# Altium integrated library Altium_Header.IntLib: 503 symbols (part 10 of 11)
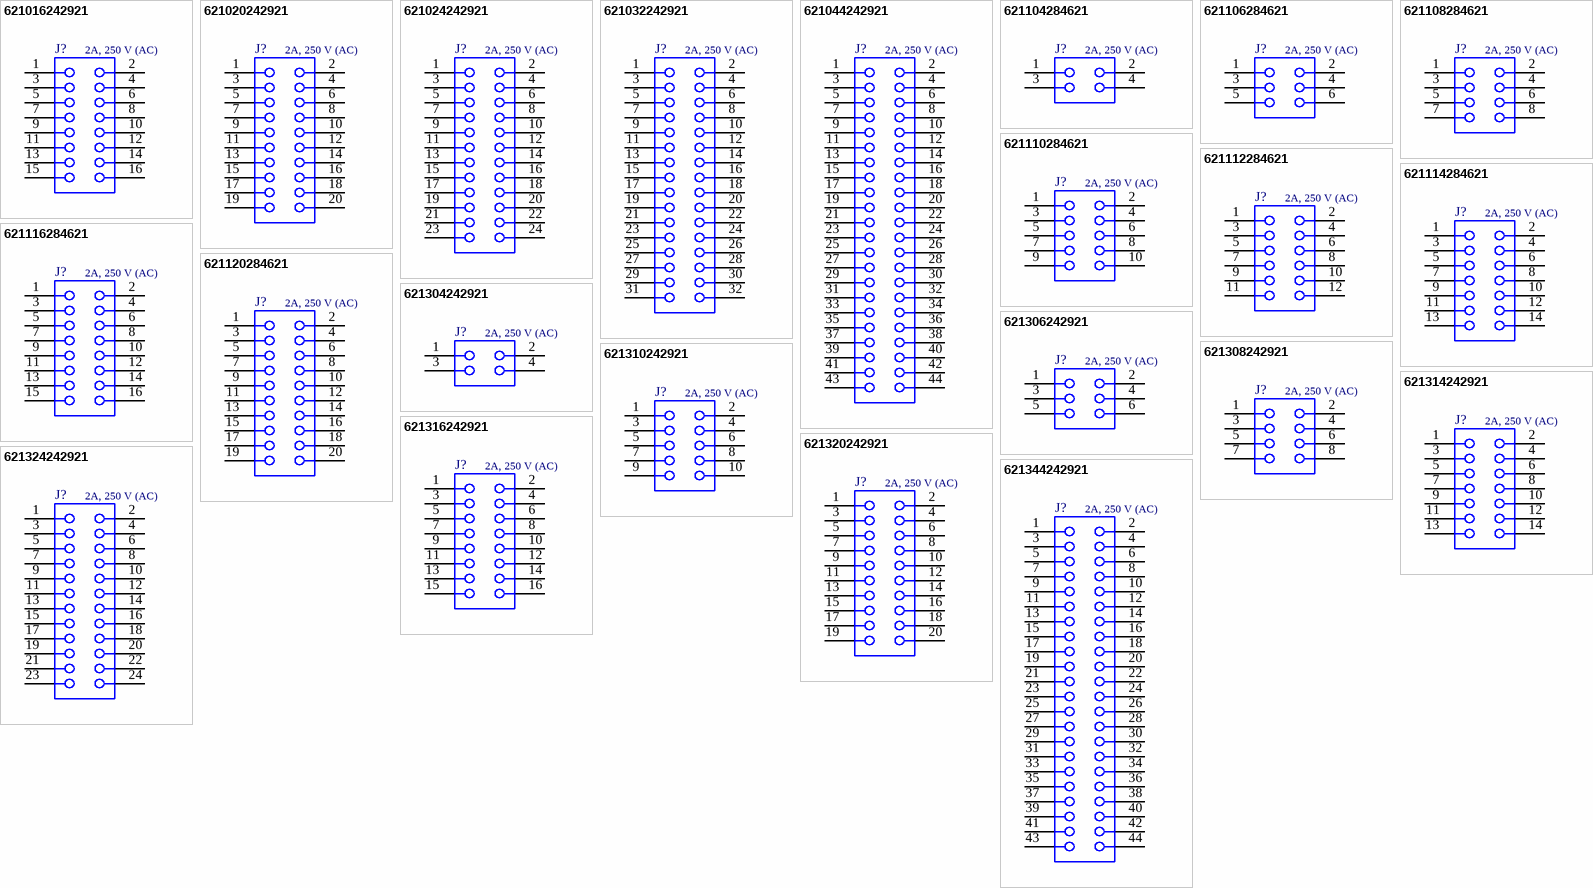
[diagram p25: symbols 621016242921 to 621344242921]

## 621306242921
designator J?, comment 2A, 250 V (AC)
WR-PHD Socket Header, SMT, pitch 2mm, Dual Row, Vertical, 6p; Manufacturer Part Number: 621306242921; Manufacturer: Wurth Elektronik; Pin Number: 6; Working Voltage: 250VAC; Withstanding Voltage: 500VAC; Contact Resistance: 20mOhm; ComponentLink1Description: Datasheet; ComponentLink1URL: https://www.we-online.com/catalog/datasheet/621306242921.pdf; Published Date: May 2020; Pitch: 2mm; Packaging: Tape and Reel; Gender: Socket Header; Rated Current: 2A; Row Number: Dual; Orientation: Vertical; Supplier 1 URL: N/A; Supplier 2 URL: N/A; Supplier 3 URL: N/A; Mount: SMD/SMT; Operating Temperature Max: + 85 C; Operating Temperature Min: - 25 C; Supplier 1: Mouser; Supplier 1 Part Number: N/A; Supplier 2: Digi-Key; Supplier 2 Part Number: N/A; Supplier 3: thegioiic; Supplier 3 Part Number: N/A; Value: 2A, 250 V (AC)
footprint 621306242921
pins: 1, 2, 3, 4, 5, 6

## 621308242921
designator J?, comment 2A, 250 V (AC)
WR-PHD Socket Header, SMT, pitch 2mm, Dual Row, Vertical, 8p; Manufacturer Part Number: 621308242921; Manufacturer: Wurth Elektronik; Pin Number: 8; Working Voltage: 250VAC; Withstanding Voltage: 500VAC; Contact Resistance: 20mOhm; ComponentLink1Description: Datasheet; ComponentLink1URL: https://www.we-online.com/catalog/datasheet/621308242921.pdf; Published Date: May 2020; Pitch: 2mm; Packaging: Tape and Reel; Gender: Socket Header; Rated Current: 2A; Row Number: Dual; Orientation: Vertical; Supplier 1 URL: N/A; Supplier 2 URL: N/A; Supplier 3 URL: N/A; Mount: SMD/SMT; Operating Temperature Max: + 85 C; Operating Temperature Min: - 25 C; Supplier 1: Mouser; Supplier 1 Part Number: N/A; Supplier 2: Digi-Key; Supplier 2 Part Number: N/A; Supplier 3: thegioiic; Supplier 3 Part Number: N/A; Value: 2A, 250 V (AC)
footprint 621308242921
pins: 1, 2, 3, 4, 5, 6, 7, 8

## 621310242921
designator J?, comment 2A, 250 V (AC)
WR-PHD Socket Header, SMT, pitch 2mm, Dual Row, Vertical, 10p; Manufacturer Part Number: 621310242921; Manufacturer: Wurth Elektronik; Pin Number: 10; Working Voltage: 250VAC; Withstanding Voltage: 500VAC; Contact Resistance: 20mOhm; ComponentLink1Description: Datasheet; ComponentLink1URL: https://www.we-online.com/catalog/datasheet/621310242921.pdf; Published Date: May 2020; Pitch: 2mm; Packaging: Tape and Reel; Gender: Socket Header; Rated Current: 2A; Row Number: Dual; Orientation: Vertical; Supplier 1 URL: N/A; Supplier 2 URL: N/A; Supplier 3 URL: N/A; Mount: SMD/SMT; Operating Temperature Max: + 85 C; Operating Temperature Min: - 25 C; Supplier 1: Mouser; Supplier 1 Part Number: N/A; Supplier 2: Digi-Key; Supplier 2 Part Number: N/A; Supplier 3: thegioiic; Supplier 3 Part Number: N/A; Value: 2A, 250 V (AC)
footprint 621310242921
pins: 1, 2, 3, 4, 5, 6, 7, 8, 9, 10

## 621314242921
designator J?, comment 2A, 250 V (AC)
WR-PHD Socket Header, SMT, pitch 2mm, Dual Row, Vertical, 14p; Manufacturer Part Number: 621314242921; Manufacturer: Wurth Elektronik; Pin Number: 14; Working Voltage: 250VAC; Withstanding Voltage: 500VAC; Contact Resistance: 20mOhm; ComponentLink1Description: Datasheet; ComponentLink1URL: https://www.we-online.com/catalog/datasheet/621314242921.pdf; Published Date: May 2020; Pitch: 2mm; Packaging: Tape and Reel; Gender: Socket Header; Rated Current: 2A; Row Number: Dual; Orientation: Vertical; Supplier 1 URL: N/A; Supplier 2 URL: N/A; Supplier 3 URL: N/A; Mount: SMD/SMT; Operating Temperature Max: + 85 C; Operating Temperature Min: - 25 C; Supplier 1: Mouser; Supplier 1 Part Number: N/A; Supplier 2: Digi-Key; Supplier 2 Part Number: N/A; Supplier 3: thegioiic; Supplier 3 Part Number: N/A; Value: 2A, 250 V (AC)
footprint 621314242921
pins: 1, 2, 3, 4, 5, 6, 7, 8, 9, 10, 11, 12, 13, 14

## 621316242921
designator J?, comment 2A, 250 V (AC)
WR-PHD Socket Header, SMT, pitch 2mm, Dual Row, Vertical, 16p; Manufacturer Part Number: 621316242921; Manufacturer: Wurth Elektronik; Pin Number: 16; Working Voltage: 250VAC; Withstanding Voltage: 500VAC; Contact Resistance: 20mOhm; ComponentLink1Description: Datasheet; ComponentLink1URL: https://www.we-online.com/catalog/datasheet/621316242921.pdf; Published Date: May 2020; Pitch: 2mm; Packaging: Tape and Reel; Gender: Socket Header; Rated Current: 2A; Row Number: Dual; Orientation: Vertical; Supplier 1 URL: N/A; Supplier 2 URL: N/A; Supplier 3 URL: N/A; Mount: SMD/SMT; Operating Temperature Max: + 85 C; Operating Temperature Min: - 25 C; Supplier 1: Mouser; Supplier 1 Part Number: N/A; Supplier 2: Digi-Key; Supplier 2 Part Number: N/A; Supplier 3: thegioiic; Supplier 3 Part Number: N/A; Value: 2A, 250 V (AC)
footprint 621316242921
pins: 1, 2, 3, 4, 5, 6, 7, 8, 9, 10, 11, 12, 13, 14, 15, 16

## 621320242921
designator J?, comment 2A, 250 V (AC)
WR-PHD Socket Header, SMT, pitch 2mm, Dual Row, Vertical, 20p; Manufacturer Part Number: 621320242921; Manufacturer: Wurth Elektronik; Pin Number: 20; Working Voltage: 250VAC; Withstanding Voltage: 500VAC; Contact Resistance: 20mOhm; ComponentLink1Description: Datasheet; ComponentLink1URL: https://www.we-online.com/catalog/datasheet/621320242921.pdf; Published Date: May 2020; Pitch: 2mm; Packaging: Tape and Reel; Gender: Socket Header; Rated Current: 2A; Row Number: Dual; Orientation: Vertical; Supplier 1 URL: N/A; Supplier 2 URL: N/A; Supplier 3 URL: N/A; Mount: SMD/SMT; Operating Temperature Max: + 85 C; Operating Temperature Min: - 25 C; Supplier 1: Mouser; Supplier 1 Part Number: N/A; Supplier 2: Digi-Key; Supplier 2 Part Number: N/A; Supplier 3: thegioiic; Supplier 3 Part Number: N/A; Value: 2A, 250 V (AC)
footprint 621320242921
pins: 1, 2, 3, 4, 5, 6, 7, 8, 9, 10, 11, 12, 13, 14, 15, 16, 17, 18, 19, 20

## 621324242921
designator J?, comment 2A, 250 V (AC)
WR-PHD Socket Header, SMT, pitch 2mm, Dual Row, Vertical, 24p; Manufacturer Part Number: 621324242921; Manufacturer: Wurth Elektronik; Pin Number: 24; Working Voltage: 250VAC; Withstanding Voltage: 500VAC; Contact Resistance: 20mOhm; ComponentLink1Description: Datasheet; ComponentLink1URL: https://www.we-online.com/catalog/datasheet/621324242921.pdf; Published Date: May 2020; Pitch: 2mm; Packaging: Tape and Reel; Gender: Socket Header; Rated Current: 2A; Row Number: Dual; Orientation: Vertical; Supplier 1 URL: N/A; Supplier 2 URL: N/A; Supplier 3 URL: N/A; Mount: SMD/SMT; Operating Temperature Max: + 85 C; Operating Temperature Min: - 25 C; Supplier 1: Mouser; Supplier 1 Part Number: N/A; Supplier 2: Digi-Key; Supplier 2 Part Number: N/A; Supplier 3: thegioiic; Supplier 3 Part Number: N/A; Value: 2A, 250 V (AC)
footprint 621324242921
pins: 1, 2, 3, 4, 5, 6, 7, 8, 9, 10, 11, 12, 13, 14, 15, 16, 17, 18, 19, 20, 21, 22, 23, 24

## 621344242921
designator J?, comment 2A, 250 V (AC)
WR-PHD Socket Header, SMT, pitch 2mm, Dual Row, Vertical, 44p; Manufacturer Part Number: 621344242921; Manufacturer: Wurth Elektronik; Pin Number: 44; Working Voltage: 250VAC; Withstanding Voltage: 500VAC; Contact Resistance: 20mOhm; ComponentLink1Description: Datasheet; ComponentLink1URL: https://www.we-online.com/catalog/datasheet/621344242921.pdf; Published Date: May 2020; Pitch: 2mm; Packaging: Tape and Reel; Gender: Socket Header; Rated Current: 2A; Row Number: Dual; Orientation: Vertical; Supplier 1 URL: N/A; Supplier 2 URL: N/A; Supplier 3 URL: N/A; Mount: SMD/SMT; Operating Temperature Max: + 85 C; Operating Temperature Min: - 25 C; Supplier 1: Mouser; Supplier 1 Part Number: N/A; Supplier 2: Digi-Key; Supplier 2 Part Number: N/A; Supplier 3: thegioiic; Supplier 3 Part Number: N/A; Value: 2A, 250 V (AC)
footprint 621344242921
pins: 1, 2, 3, 4, 5, 6, 7, 8, 9, 10, 11, 12, 13, 14, 15, 16, 17, 18, 19, 20, 21, 22, 23, 24, 25, 26, 27, 28, 29, 30, 31, 32, 33, 34, 35, 36, 37, 38, 39, 40, 41, 42, 43, 44


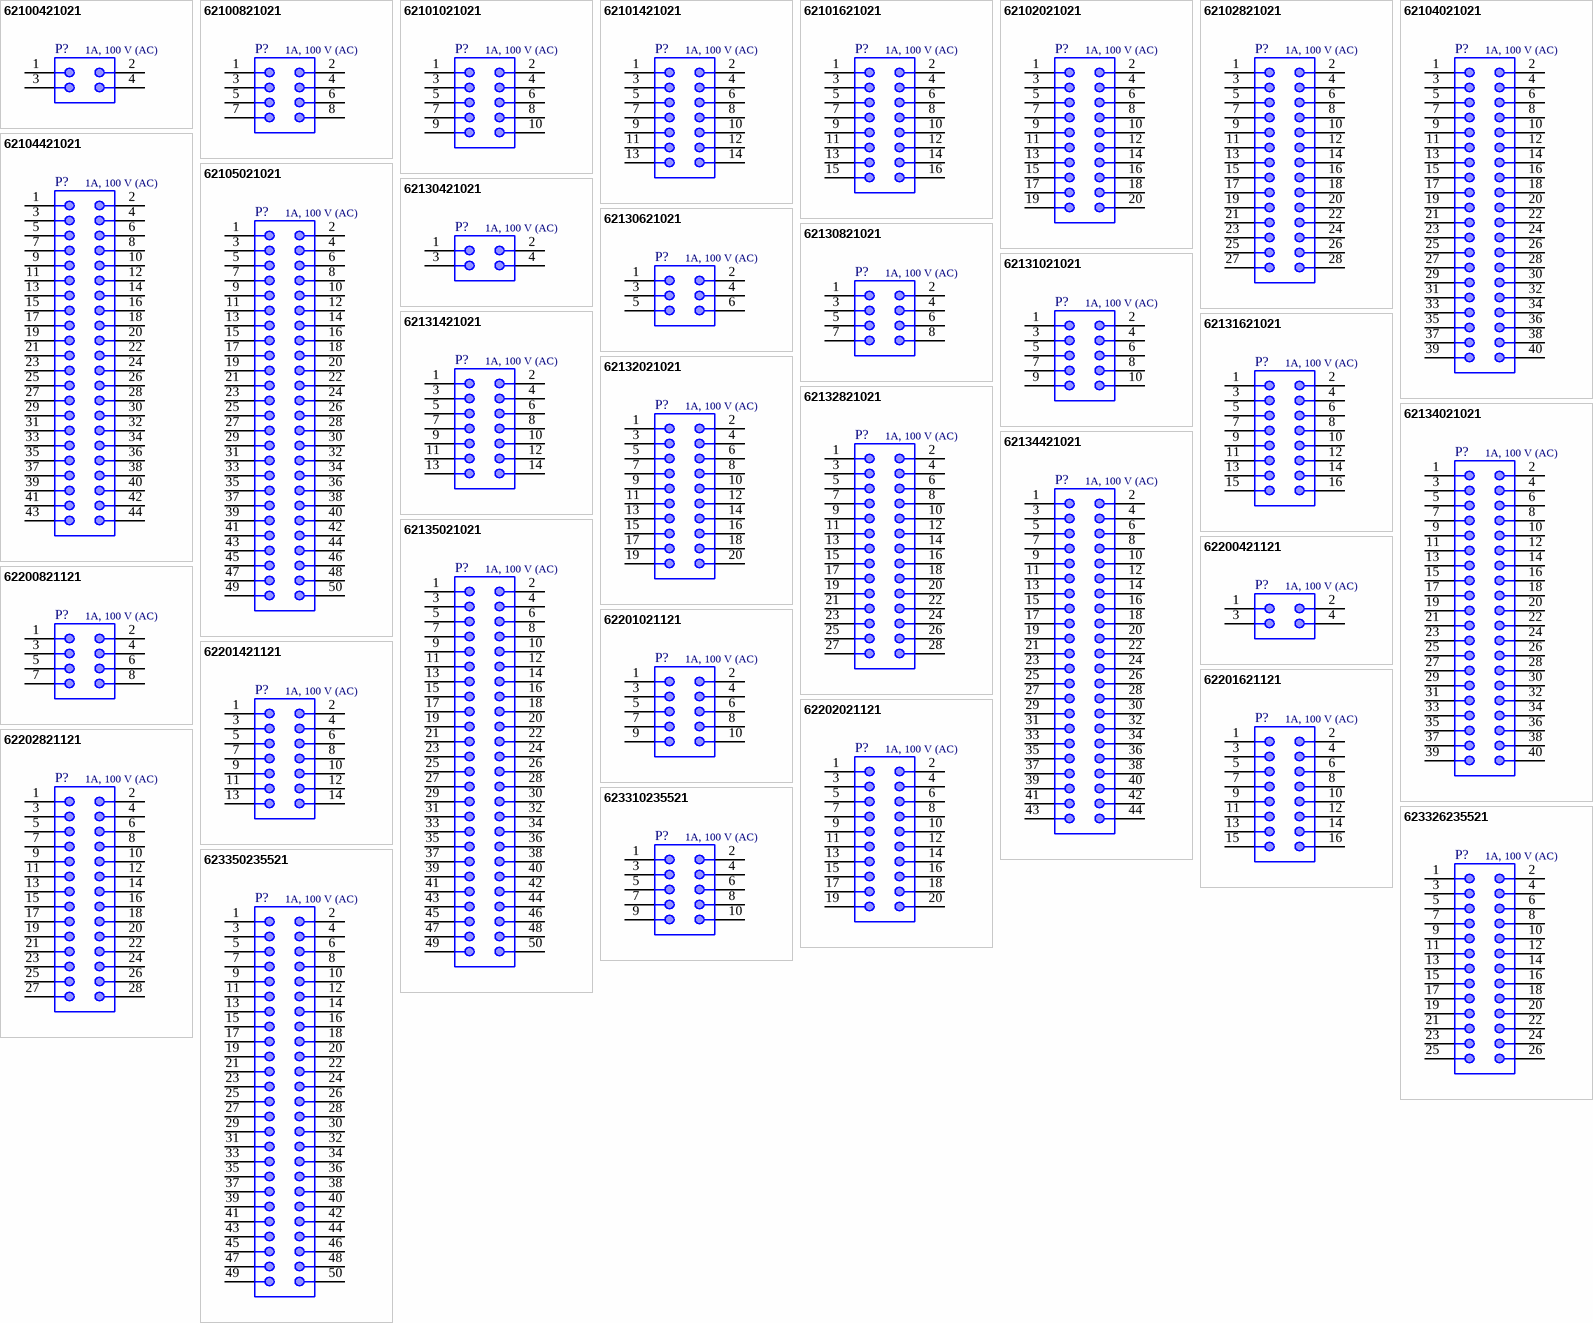
[diagram p15: symbols 62100421021 to 623350235521]

## 62100421021
designator P?, comment 1A, 100 V (AC)
WR-PHD Pin Header, SMT, pitch 1.27mm, Dual Row, Vertical, 4p; Manufacturer Part Number: 62100421021; Manufacturer: Wurth Elektronik; Pin Number: 4; Working Voltage: 100VAC; Withstanding Voltage: 500VAC; Contact Resistance: 20mOhm; ComponentLink1Description: Datasheet; ComponentLink1URL: https://www.we-online.com/catalog/datasheet/62100421021.pdf; Published Date: May 2020; Pitch: 1.27mm; Packaging: Tube; Gender: Pin Header; Rated Current: 1A; Row Number: Dual; Orientation: Vertical; Supplier 1 URL: N/A; Supplier 2 URL: N/A; Supplier 3 URL: N/A; LCSC Part #: N/A; Mount: SMD/SMT; Operating Temperature Max: + 105 C; Operating Temperature Min: - 40 C; Supplier 1: Mouser; Supplier 1 Part Number: N/A; Supplier 2: Digi-Key; Supplier 2 Part Number: N/A; Supplier 3: thegioiic; Supplier 3 Part Number: N/A; Value: 1A, 100 V (AC)
footprint 62100421021
pins: 1, 2, 3, 4

## 62100821021
designator P?, comment 1A, 100 V (AC)
WR-PHD Pin Header, SMT, pitch 1.27mm, Dual Row, Vertical, 8p; Manufacturer Part Number: 62100821021; Manufacturer: Wurth Elektronik; Pin Number: 8; Working Voltage: 100VAC; Withstanding Voltage: 500VAC; Contact Resistance: 20mOhm; ComponentLink1Description: Datasheet; ComponentLink1URL: https://www.we-online.com/catalog/datasheet/62100821021.pdf; Published Date: May 2020; Pitch: 1.27mm; Packaging: Tube; Gender: Pin Header; Rated Current: 1A; Row Number: Dual; Orientation: Vertical; Supplier 1 URL: N/A; Supplier 2 URL: N/A; Supplier 3 URL: N/A; LCSC Part #: N/A; Mount: SMD/SMT; Operating Temperature Max: + 105 C; Operating Temperature Min: - 40 C; Supplier 1: Mouser; Supplier 1 Part Number: N/A; Supplier 2: Digi-Key; Supplier 2 Part Number: N/A; Supplier 3: thegioiic; Supplier 3 Part Number: N/A; Value: 1A, 100 V (AC)
footprint 62100821021
pins: 1, 2, 3, 4, 5, 6, 7, 8

## 62101021021
designator P?, comment 1A, 100 V (AC)
WR-PHD Pin Header, SMT, pitch 1.27mm, Dual Row, Vertical, 10p; Manufacturer Part Number: 62101021021; Manufacturer: Wurth Elektronik; Pin Number: 10; Working Voltage: 100VAC; Withstanding Voltage: 500VAC; Contact Resistance: 20mOhm; ComponentLink1Description: Datasheet; ComponentLink1URL: https://www.we-online.com/catalog/datasheet/62101021021.pdf; Published Date: May 2020; Pitch: 1.27mm; Packaging: Tube; Gender: Pin Header; Rated Current: 1A; Row Number: Dual; Orientation: Vertical; Supplier 1 URL: N/A; Supplier 2 URL: N/A; Supplier 3 URL: N/A; LCSC Part #: N/A; Mount: SMD/SMT; Operating Temperature Max: + 105 C; Operating Temperature Min: - 40 C; Supplier 1: Mouser; Supplier 1 Part Number: N/A; Supplier 2: Digi-Key; Supplier 2 Part Number: N/A; Supplier 3: thegioiic; Supplier 3 Part Number: N/A; Value: 1A, 100 V (AC)
footprint 62101021021
pins: 1, 2, 3, 4, 5, 6, 7, 8, 9, 10

## 62101421021
designator P?, comment 1A, 100 V (AC)
WR-PHD Pin Header, SMT, pitch 1.27mm, Dual Row, Vertical, 14p; Manufacturer Part Number: 62101421021; Manufacturer: Wurth Elektronik; Pin Number: 14; Working Voltage: 100VAC; Withstanding Voltage: 500VAC; Contact Resistance: 20mOhm; ComponentLink1Description: Datasheet; ComponentLink1URL: https://www.we-online.com/catalog/datasheet/62101421021.pdf; Published Date: May 2020; Pitch: 1.27mm; Packaging: Tube; Gender: Pin Header; Rated Current: 1A; Row Number: Dual; Orientation: Vertical; Supplier 1 URL: N/A; Supplier 2 URL: N/A; Supplier 3 URL: N/A; LCSC Part #: N/A; Mount: SMD/SMT; Operating Temperature Max: + 105 C; Operating Temperature Min: - 40 C; Supplier 1: Mouser; Supplier 1 Part Number: N/A; Supplier 2: Digi-Key; Supplier 2 Part Number: N/A; Supplier 3: thegioiic; Supplier 3 Part Number: N/A; Value: 1A, 100 V (AC)
footprint 62101421021
pins: 1, 2, 3, 4, 5, 6, 7, 8, 9, 10, 11, 12, 13, 14

## 62101621021
designator P?, comment 1A, 100 V (AC)
WR-PHD Pin Header, SMT, pitch 1.27mm, Dual Row, Vertical, 16p; Manufacturer Part Number: 62101621021; Manufacturer: Wurth Elektronik; Pin Number: 16; Working Voltage: 100VAC; Withstanding Voltage: 500VAC; Contact Resistance: 20mOhm; ComponentLink1Description: Datasheet; ComponentLink1URL: https://www.we-online.com/catalog/datasheet/62101621021.pdf; Published Date: May 2020; Pitch: 1.27mm; Packaging: Tube; Gender: Pin Header; Rated Current: 1A; Row Number: Dual; Orientation: Vertical; Supplier 1 URL: N/A; Supplier 2 URL: N/A; Supplier 3 URL: N/A; LCSC Part #: N/A; Mount: SMD/SMT; Operating Temperature Max: + 105 C; Operating Temperature Min: - 40 C; Supplier 1: Mouser; Supplier 1 Part Number: N/A; Supplier 2: Digi-Key; Supplier 2 Part Number: N/A; Supplier 3: thegioiic; Supplier 3 Part Number: N/A; Value: 1A, 100 V (AC)
footprint 62101621021
pins: 1, 2, 3, 4, 5, 6, 7, 8, 9, 10, 11, 12, 13, 14, 15, 16

## 62102021021
designator P?, comment 1A, 100 V (AC)
WR-PHD Pin Header, SMT, pitch 1.27mm, Dual Row, Vertical, 20p; Manufacturer Part Number: 62102021021; Manufacturer: Wurth Elektronik; Pin Number: 20; Working Voltage: 100VAC; Withstanding Voltage: 500VAC; Contact Resistance: 20mOhm; ComponentLink1Description: Datasheet; ComponentLink1URL: https://www.we-online.com/catalog/datasheet/62102021021.pdf; Published Date: May 2020; Pitch: 1.27mm; Packaging: Tube; Gender: Pin Header; Rated Current: 1A; Row Number: Dual; Orientation: Vertical; Supplier 1 URL: N/A; Supplier 2 URL: N/A; Supplier 3 URL: N/A; LCSC Part #: N/A; Mount: SMD/SMT; Operating Temperature Max: + 105 C; Operating Temperature Min: - 40 C; Supplier 1: Mouser; Supplier 1 Part Number: N/A; Supplier 2: Digi-Key; Supplier 2 Part Number: N/A; Supplier 3: thegioiic; Supplier 3 Part Number: N/A; Value: 1A, 100 V (AC)
footprint 62102021021
pins: 1, 2, 3, 4, 5, 6, 7, 8, 9, 10, 11, 12, 13, 14, 15, 16, 17, 18, 19, 20

## 62102821021
designator P?, comment 1A, 100 V (AC)
WR-PHD Pin Header, SMT, pitch 1.27mm, Dual Row, Vertical, 28p; Manufacturer Part Number: 62102821021; Manufacturer: Wurth Elektronik; Pin Number: 28; Working Voltage: 100VAC; Withstanding Voltage: 500VAC; Contact Resistance: 20mOhm; ComponentLink1Description: Datasheet; ComponentLink1URL: https://www.we-online.com/catalog/datasheet/62102821021.pdf; Published Date: May 2020; Pitch: 1.27mm; Packaging: Tube; Gender: Pin Header; Rated Current: 1A; Row Number: Dual; Orientation: Vertical; Supplier 1 URL: N/A; Supplier 2 URL: N/A; Supplier 3 URL: N/A; LCSC Part #: N/A; Mount: SMD/SMT; Operating Temperature Max: + 105 C; Operating Temperature Min: - 40 C; Supplier 1: Mouser; Supplier 1 Part Number: N/A; Supplier 2: Digi-Key; Supplier 2 Part Number: N/A; Supplier 3: thegioiic; Supplier 3 Part Number: N/A; Value: 1A, 100 V (AC)
footprint 62102821021
pins: 1, 2, 3, 4, 5, 6, 7, 8, 9, 10, 11, 12, 13, 14, 15, 16, 17, 18, 19, 20, 21, 22, 23, 24, 25, 26, 27, 28

## 62104021021
designator P?, comment 1A, 100 V (AC)
WR-PHD Pin Header, SMT, pitch 1.27mm, Dual Row, Vertical, 40p; Manufacturer Part Number: 62104021021; Manufacturer: Wurth Elektronik; Pin Number: 40; Working Voltage: 100VAC; Withstanding Voltage: 500VAC; Contact Resistance: 20mOhm; ComponentLink1Description: Datasheet; ComponentLink1URL: https://www.we-online.com/catalog/datasheet/62104021021.pdf; Published Date: May 2020; Pitch: 1.27mm; Packaging: Tube; Gender: Pin Header; Rated Current: 1A; Row Number: Dual; Orientation: Vertical; Supplier 1 URL: N/A; Supplier 2 URL: N/A; Supplier 3 URL: N/A; LCSC Part #: N/A; Mount: SMD/SMT; Operating Temperature Max: + 105 C; Operating Temperature Min: - 40 C; Supplier 1: Mouser; Supplier 1 Part Number: N/A; Supplier 2: Digi-Key; Supplier 2 Part Number: N/A; Supplier 3: thegioiic; Supplier 3 Part Number: N/A; Value: 1A, 100 V (AC)
footprint 62104021021
pins: 1, 2, 3, 4, 5, 6, 7, 8, 9, 10, 11, 12, 13, 14, 15, 16, 17, 18, 19, 20, 21, 22, 23, 24, 25, 26, 27, 28, 29, 30, 31, 32, 33, 34, 35, 36, 37, 38, 39, 40

## 62104421021
designator P?, comment 1A, 100 V (AC)
WR-PHD Pin Header, SMT, pitch 1.27mm, Dual Row, Vertical, 44p; Manufacturer Part Number: 62104421021; Manufacturer: Wurth Elektronik; Pin Number: 44; Working Voltage: 100VAC; Withstanding Voltage: 500VAC; Contact Resistance: 20mOhm; ComponentLink1Description: Datasheet; ComponentLink1URL: https://www.we-online.com/catalog/datasheet/62104421021.pdf; Published Date: May 2020; Pitch: 1.27mm; Packaging: Tube; Gender: Pin Header; Rated Current: 1A; Row Number: Dual; Orientation: Vertical; Supplier 1 URL: N/A; Supplier 2 URL: N/A; Supplier 3 URL: N/A; LCSC Part #: N/A; Mount: SMD/SMT; Operating Temperature Max: + 105 C; Operating Temperature Min: - 40 C; Supplier 1: Mouser; Supplier 1 Part Number: N/A; Supplier 2: Digi-Key; Supplier 2 Part Number: N/A; Supplier 3: thegioiic; Supplier 3 Part Number: N/A; Value: 1A, 100 V (AC)
footprint 62104421021
pins: 1, 2, 3, 4, 5, 6, 7, 8, 9, 10, 11, 12, 13, 14, 15, 16, 17, 18, 19, 20, 21, 22, 23, 24, 25, 26, 27, 28, 29, 30, 31, 32, 33, 34, 35, 36, 37, 38, 39, 40, 41, 42, 43, 44

## 62105021021
designator P?, comment 1A, 100 V (AC)
WR-PHD Pin Header, SMT, pitch 1.27mm, Dual Row, Vertical, 50p; Manufacturer Part Number: 62105021021; Manufacturer: Wurth Elektronik; Pin Number: 50; Working Voltage: 100VAC; Withstanding Voltage: 500VAC; Contact Resistance: 20mOhm; ComponentLink1Description: Datasheet; ComponentLink1URL: https://www.we-online.com/catalog/datasheet/62105021021.pdf; Published Date: May 2020; Pitch: 1.27mm; Packaging: Tube; Gender: Pin Header; Rated Current: 1A; Row Number: Dual; Orientation: Vertical; Supplier 1 URL: N/A; Supplier 2 URL: N/A; Supplier 3 URL: N/A; LCSC Part #: N/A; Mount: SMD/SMT; Operating Temperature Max: + 105 C; Operating Temperature Min: - 40 C; Supplier 1: Mouser; Supplier 1 Part Number: N/A; Supplier 2: Digi-Key; Supplier 2 Part Number: N/A; Supplier 3: thegioiic; Supplier 3 Part Number: N/A; Value: 1A, 100 V (AC)
footprint 62105021021
pins: 1, 2, 3, 4, 5, 6, 7, 8, 9, 10, 11, 12, 13, 14, 15, 16, 17, 18, 19, 20, 21, 22, 23, 24, 25, 26, 27, 28, 29, 30, 31, 32, 33, 34, 35, 36, 37, 38, 39, 40, 41, 42, 43, 44, 45, 46, 47, 48, 49, 50

## 62130421021
designator P?, comment 1A, 100 V (AC)
WR-PHD Pin Header, SMT, pitch 1.27mm, Dual Row, Vertical, 4p; Manufacturer Part Number: 62130421021; Manufacturer: Wurth Elektronik; Pin Number: 4; Working Voltage: 100VAC; Withstanding Voltage: 500VAC; Contact Resistance: 20mOhm; ComponentLink1Description: Datasheet; ComponentLink1URL: https://www.we-online.com/catalog/datasheet/62130421021.pdf; Published Date: May 2020; Pitch: 1.27mm; Packaging: Tape and Reel; Gender: Pin Header; Rated Current: 1A; Row Number: Dual; Orientation: Vertical; Supplier 1 URL: N/A; Supplier 2 URL: N/A; Supplier 3 URL: N/A; LCSC Part #: N/A; Mount: SMD/SMT; Operating Temperature Max: + 105 C; Operating Temperature Min: - 40 C; Supplier 1: Mouser; Supplier 1 Part Number: N/A; Supplier 2: Digi-Key; Supplier 2 Part Number: N/A; Supplier 3: thegioiic; Supplier 3 Part Number: N/A; Value: 1A, 100 V (AC)
footprint 62130421021
pins: 1, 2, 3, 4

## 62130621021
designator P?, comment 1A, 100 V (AC)
WR-PHD Pin Header, SMT, pitch 1.27mm, Dual Row, Vertical, 6p; Manufacturer Part Number: 62130621021; Manufacturer: Wurth Elektronik; Pin Number: 6; Working Voltage: 100VAC; Withstanding Voltage: 500VAC; Contact Resistance: 20mOhm; ComponentLink1Description: Datasheet; ComponentLink1URL: https://www.we-online.com/catalog/datasheet/62130621021.pdf; Published Date: May 2020; Pitch: 1.27mm; Packaging: Tape and Reel; Gender: Pin Header; Rated Current: 1A; Row Number: Dual; Orientation: Vertical; Supplier 1 URL: N/A; Supplier 2 URL: N/A; Supplier 3 URL: N/A; LCSC Part #: N/A; Mount: SMD/SMT; Operating Temperature Max: + 105 C; Operating Temperature Min: - 40 C; Supplier 1: Mouser; Supplier 1 Part Number: N/A; Supplier 2: Digi-Key; Supplier 2 Part Number: N/A; Supplier 3: thegioiic; Supplier 3 Part Number: N/A; Value: 1A, 100 V (AC)
footprint 62130621021
pins: 1, 2, 3, 4, 5, 6

## 62130821021
designator P?, comment 1A, 100 V (AC)
WR-PHD Pin Header, SMT, pitch 1.27mm, Dual Row, Vertical, 8p; Manufacturer Part Number: 62130821021; Manufacturer: Wurth Elektronik; Pin Number: 8; Working Voltage: 100VAC; Withstanding Voltage: 500VAC; Contact Resistance: 20mOhm; ComponentLink1Description: Datasheet; ComponentLink1URL: https://www.we-online.com/catalog/datasheet/62130821021.pdf; Published Date: May 2020; Pitch: 1.27mm; Packaging: Tape and Reel; Gender: Pin Header; Rated Current: 1A; Row Number: Dual; Orientation: Vertical; Supplier 1 URL: N/A; Supplier 2 URL: N/A; Supplier 3 URL: N/A; LCSC Part #: N/A; Mount: SMD/SMT; Operating Temperature Max: + 105 C; Operating Temperature Min: - 40 C; Supplier 1: Mouser; Supplier 1 Part Number: N/A; Supplier 2: Digi-Key; Supplier 2 Part Number: N/A; Supplier 3: thegioiic; Supplier 3 Part Number: N/A; Value: 1A, 100 V (AC)
footprint 62130821021
pins: 1, 2, 3, 4, 5, 6, 7, 8

## 62131021021
designator P?, comment 1A, 100 V (AC)
WR-PHD Pin Header, SMT, pitch 1.27mm, Dual Row, Vertical, 10p; Manufacturer Part Number: 62131021021; Manufacturer: Wurth Elektronik; Pin Number: 10; Working Voltage: 100VAC; Withstanding Voltage: 500VAC; Contact Resistance: 20mOhm; ComponentLink1Description: Datasheet; ComponentLink1URL: https://www.we-online.com/catalog/datasheet/62131021021.pdf; Published Date: May 2020; Pitch: 1.27mm; Packaging: Tape and Reel; Gender: Pin Header; Rated Current: 1A; Row Number: Dual; Orientation: Vertical; Supplier 1 URL: N/A; Supplier 2 URL: N/A; Supplier 3 URL: N/A; LCSC Part #: N/A; Mount: SMD/SMT; Operating Temperature Max: + 105 C; Operating Temperature Min: - 40 C; Supplier 1: Mouser; Supplier 1 Part Number: N/A; Supplier 2: Digi-Key; Supplier 2 Part Number: N/A; Supplier 3: thegioiic; Supplier 3 Part Number: N/A; Value: 1A, 100 V (AC)
footprint 62131021021
pins: 1, 2, 3, 4, 5, 6, 7, 8, 9, 10

## 62131421021
designator P?, comment 1A, 100 V (AC)
WR-PHD Pin Header, SMT, pitch 1.27mm, Dual Row, Vertical, 14p; Manufacturer Part Number: 62131421021; Manufacturer: Wurth Elektronik; Pin Number: 14; Working Voltage: 100VAC; Withstanding Voltage: 500VAC; Contact Resistance: 20mOhm; ComponentLink1Description: Datasheet; ComponentLink1URL: https://www.we-online.com/catalog/datasheet/62131421021.pdf; Published Date: May 2020; Pitch: 1.27mm; Packaging: Tape and Reel; Gender: Pin Header; Rated Current: 1A; Row Number: Dual; Orientation: Vertical; Supplier 1 URL: N/A; Supplier 2 URL: N/A; Supplier 3 URL: N/A; LCSC Part #: N/A; Mount: SMD/SMT; Operating Temperature Max: + 105 C; Operating Temperature Min: - 40 C; Supplier 1: Mouser; Supplier 1 Part Number: N/A; Supplier 2: Digi-Key; Supplier 2 Part Number: N/A; Supplier 3: thegioiic; Supplier 3 Part Number: N/A; Value: 1A, 100 V (AC)
footprint 62131421021
pins: 1, 2, 3, 4, 5, 6, 7, 8, 9, 10, 11, 12, 13, 14

## 62131621021
designator P?, comment 1A, 100 V (AC)
WR-PHD Pin Header, SMT, pitch 1.27mm, Dual Row, Vertical, 16p; Manufacturer Part Number: 62131621021; Manufacturer: Wurth Elektronik; Pin Number: 16; Working Voltage: 100VAC; Withstanding Voltage: 500VAC; Contact Resistance: 20mOhm; ComponentLink1Description: Datasheet; ComponentLink1URL: https://www.we-online.com/catalog/datasheet/62131621021.pdf; Published Date: May 2020; Pitch: 1.27mm; Packaging: Tape and Reel; Gender: Pin Header; Rated Current: 1A; Row Number: Dual; Orientation: Vertical; Supplier 1 URL: N/A; Supplier 2 URL: N/A; Supplier 3 URL: N/A; LCSC Part #: N/A; Mount: SMD/SMT; Operating Temperature Max: + 105 C; Operating Temperature Min: - 40 C; Supplier 1: Mouser; Supplier 1 Part Number: N/A; Supplier 2: Digi-Key; Supplier 2 Part Number: N/A; Supplier 3: thegioiic; Supplier 3 Part Number: N/A; Value: 1A, 100 V (AC)
footprint 62131621021
pins: 1, 2, 3, 4, 5, 6, 7, 8, 9, 10, 11, 12, 13, 14, 15, 16

## 62132021021
designator P?, comment 1A, 100 V (AC)
WR-PHD Pin Header, SMT, pitch 1.27mm, Dual Row, Vertical, 20p; Manufacturer Part Number: 62132021021; Manufacturer: Wurth Elektronik; Pin Number: 20; Working Voltage: 100VAC; Withstanding Voltage: 500VAC; Contact Resistance: 20mOhm; ComponentLink1Description: Datasheet; ComponentLink1URL: https://www.we-online.com/catalog/datasheet/62132021021.pdf; Published Date: May 2020; Pitch: 1.27mm; Packaging: Tape and Reel; Gender: Pin Header; Rated Current: 1A; Row Number: Dual; Orientation: Vertical; Supplier 1 URL: N/A; Supplier 2 URL: N/A; Supplier 3 URL: N/A; LCSC Part #: N/A; Mount: SMD/SMT; Operating Temperature Max: + 105 C; Operating Temperature Min: - 40 C; Supplier 1: Mouser; Supplier 1 Part Number: N/A; Supplier 2: Digi-Key; Supplier 2 Part Number: N/A; Supplier 3: thegioiic; Supplier 3 Part Number: N/A; Value: 1A, 100 V (AC)
footprint 62132021021
pins: 1, 2, 3, 4, 5, 6, 7, 8, 9, 10, 11, 12, 13, 14, 15, 16, 17, 18, 19, 20

## 62132821021
designator P?, comment 1A, 100 V (AC)
WR-PHD Pin Header, SMT, pitch 1.27mm, Dual Row, Vertical, 28p; Manufacturer Part Number: 62132821021; Manufacturer: Wurth Elektronik; Pin Number: 28; Working Voltage: 100VAC; Withstanding Voltage: 500VAC; Contact Resistance: 20mOhm; ComponentLink1Description: Datasheet; ComponentLink1URL: https://www.we-online.com/catalog/datasheet/62132821021.pdf; Published Date: May 2020; Pitch: 1.27mm; Packaging: Tape and Reel; Gender: Pin Header; Rated Current: 1A; Row Number: Dual; Orientation: Vertical; Supplier 1 URL: N/A; Supplier 2 URL: N/A; Supplier 3 URL: N/A; LCSC Part #: N/A; Mount: SMD/SMT; Operating Temperature Max: + 105 C; Operating Temperature Min: - 40 C; Supplier 1: Mouser; Supplier 1 Part Number: N/A; Supplier 2: Digi-Key; Supplier 2 Part Number: N/A; Supplier 3: thegioiic; Supplier 3 Part Number: N/A; Value: 1A, 100 V (AC)
footprint 62132821021
pins: 1, 2, 3, 4, 5, 6, 7, 8, 9, 10, 11, 12, 13, 14, 15, 16, 17, 18, 19, 20, 21, 22, 23, 24, 25, 26, 27, 28

## 62134021021
designator P?, comment 1A, 100 V (AC)
WR-PHD Pin Header, SMT, pitch 1.27mm, Dual Row, Vertical, 40p; Manufacturer Part Number: 62134021021; Manufacturer: Wurth Elektronik; Pin Number: 40; Working Voltage: 100VAC; Withstanding Voltage: 500VAC; Contact Resistance: 20mOhm; ComponentLink1Description: Datasheet; ComponentLink1URL: https://www.we-online.com/catalog/datasheet/62134021021.pdf; Published Date: May 2020; Pitch: 1.27mm; Packaging: Tape and Reel; Gender: Pin Header; Rated Current: 1A; Row Number: Dual; Orientation: Vertical; Supplier 1 URL: N/A; Supplier 2 URL: N/A; Supplier 3 URL: N/A; LCSC Part #: N/A; Mount: SMD/SMT; Operating Temperature Max: + 105 C; Operating Temperature Min: - 40 C; Supplier 1: Mouser; Supplier 1 Part Number: N/A; Supplier 2: Digi-Key; Supplier 2 Part Number: N/A; Supplier 3: thegioiic; Supplier 3 Part Number: N/A; Value: 1A, 100 V (AC)
footprint 62134021021
pins: 1, 2, 3, 4, 5, 6, 7, 8, 9, 10, 11, 12, 13, 14, 15, 16, 17, 18, 19, 20, 21, 22, 23, 24, 25, 26, 27, 28, 29, 30, 31, 32, 33, 34, 35, 36, 37, 38, 39, 40

## 62134421021
designator P?, comment 1A, 100 V (AC)
WR-PHD Pin Header, SMT, pitch 1.27mm, Dual Row, Vertical, 44p; Manufacturer Part Number: 62134421021; Manufacturer: Wurth Elektronik; Pin Number: 44; Working Voltage: 100VAC; Withstanding Voltage: 500VAC; Contact Resistance: 20mOhm; ComponentLink1Description: Datasheet; ComponentLink1URL: https://www.we-online.com/catalog/datasheet/62134421021.pdf; Published Date: May 2020; Pitch: 1.27mm; Packaging: Tape and Reel; Gender: Pin Header; Rated Current: 1A; Row Number: Dual; Orientation: Vertical; Supplier 1 URL: N/A; Supplier 2 URL: N/A; Supplier 3 URL: N/A; LCSC Part #: N/A; Mount: SMD/SMT; Operating Temperature Max: + 105 C; Operating Temperature Min: - 40 C; Supplier 1: Mouser; Supplier 1 Part Number: N/A; Supplier 2: Digi-Key; Supplier 2 Part Number: N/A; Supplier 3: thegioiic; Supplier 3 Part Number: N/A; Value: 1A, 100 V (AC)
footprint 62134421021
pins: 1, 2, 3, 4, 5, 6, 7, 8, 9, 10, 11, 12, 13, 14, 15, 16, 17, 18, 19, 20, 21, 22, 23, 24, 25, 26, 27, 28, 29, 30, 31, 32, 33, 34, 35, 36, 37, 38, 39, 40, 41, 42, 43, 44

## 62135021021
designator P?, comment 1A, 100 V (AC)
WR-PHD Pin Header, SMT, pitch 1.27mm, Dual Row, Vertical, 50p; Manufacturer Part Number: 62135021021; Manufacturer: Wurth Elektronik; Pin Number: 50; Working Voltage: 100VAC; Withstanding Voltage: 500VAC; Contact Resistance: 20mOhm; ComponentLink1Description: Datasheet; ComponentLink1URL: https://www.we-online.com/catalog/datasheet/62135021021.pdf; Published Date: May 2020; Pitch: 1.27mm; Packaging: Tape and Reel; Gender: Pin Header; Rated Current: 1A; Row Number: Dual; Orientation: Vertical; Supplier 1 URL: N/A; Supplier 2 URL: N/A; Supplier 3 URL: N/A; LCSC Part #: N/A; Mount: SMD/SMT; Operating Temperature Max: + 105 C; Operating Temperature Min: - 40 C; Supplier 1: Mouser; Supplier 1 Part Number: N/A; Supplier 2: Digi-Key; Supplier 2 Part Number: N/A; Supplier 3: thegioiic; Supplier 3 Part Number: N/A; Value: 1A, 100 V (AC)
footprint 62135021021
pins: 1, 2, 3, 4, 5, 6, 7, 8, 9, 10, 11, 12, 13, 14, 15, 16, 17, 18, 19, 20, 21, 22, 23, 24, 25, 26, 27, 28, 29, 30, 31, 32, 33, 34, 35, 36, 37, 38, 39, 40, 41, 42, 43, 44, 45, 46, 47, 48, 49, 50

## 62200421121
designator P?, comment 1A, 100 V (AC)
WR-PHD Pin Header, THT, pitch 1.27mm, Dual Row, Vertical, 4p; Manufacturer Part Number: 62200421121; Manufacturer: Wurth Elektronik; Pin Number: 4; Working Voltage: 100VAC; Withstanding Voltage: 500VAC; Contact Resistance: 20mOhm; ComponentLink1Description: Datasheet; ComponentLink1URL: https://www.we-online.com/catalog/datasheet/62200421121.pdf; Published Date: May 2020; Pitch: 1.27mm; Packaging: Box; Gender: Pin Header; Rated Current: 1A; Row Number: Dual; Orientation: Vertical; Supplier 1 URL: N/A; Supplier 2 URL: N/A; Supplier 3 URL: N/A; LCSC Part #: N/A; Mount: SMD/SMT; Operating Temperature Max: + 105 C; Operating Temperature Min: - 40 C; Supplier 1: Mouser; Supplier 1 Part Number: N/A; Supplier 2: Digi-Key; Supplier 2 Part Number: N/A; Supplier 3: thegioiic; Supplier 3 Part Number: N/A; Value: 1A, 100 V (AC)
footprint 62200421121
pins: 1, 2, 3, 4

## 62200821121
designator P?, comment 1A, 100 V (AC)
WR-PHD Pin Header, THT, pitch 1.27mm, Dual Row, Vertical, 8p; Manufacturer Part Number: 62200821121; Manufacturer: Wurth Elektronik; Pin Number: 8; Working Voltage: 100VAC; Withstanding Voltage: 500VAC; Contact Resistance: 20mOhm; ComponentLink1Description: Datasheet; ComponentLink1URL: https://www.we-online.com/catalog/datasheet/62200821121.pdf; Published Date: May 2020; Pitch: 1.27mm; Packaging: Box; Gender: Pin Header; Rated Current: 1A; Row Number: Dual; Orientation: Vertical; Supplier 1 URL: N/A; Supplier 2 URL: N/A; Supplier 3 URL: N/A; LCSC Part #: N/A; Mount: SMD/SMT; Operating Temperature Max: + 105 C; Operating Temperature Min: - 40 C; Supplier 1: Mouser; Supplier 1 Part Number: N/A; Supplier 2: Digi-Key; Supplier 2 Part Number: N/A; Supplier 3: thegioiic; Supplier 3 Part Number: N/A; Value: 1A, 100 V (AC)
footprint 62200821121
pins: 1, 2, 3, 4, 5, 6, 7, 8

## 62201021121
designator P?, comment 1A, 100 V (AC)
WR-PHD Pin Header, THT, pitch 1.27mm, Dual Row, Vertical, 10p; Manufacturer Part Number: 62201021121; Manufacturer: Wurth Elektronik; Pin Number: 10; Working Voltage: 100VAC; Withstanding Voltage: 500VAC; Contact Resistance: 20mOhm; ComponentLink1Description: Datasheet; ComponentLink1URL: https://www.we-online.com/catalog/datasheet/62201021121.pdf; Published Date: May 2020; Pitch: 1.27mm; Packaging: Box; Gender: Pin Header; Rated Current: 1A; Row Number: Dual; Orientation: Vertical; Supplier 1 URL: N/A; Supplier 2 URL: N/A; Supplier 3 URL: N/A; LCSC Part #: N/A; Mount: SMD/SMT; Operating Temperature Max: + 105 C; Operating Temperature Min: - 40 C; Supplier 1: Mouser; Supplier 1 Part Number: N/A; Supplier 2: Digi-Key; Supplier 2 Part Number: N/A; Supplier 3: thegioiic; Supplier 3 Part Number: N/A; Value: 1A, 100 V (AC)
footprint 62201021121
pins: 1, 2, 3, 4, 5, 6, 7, 8, 9, 10

## 62201421121
designator P?, comment 1A, 100 V (AC)
WR-PHD Pin Header, THT, pitch 1.27mm, Dual Row, Vertical, 14p; Manufacturer Part Number: 62201421121; Manufacturer: Wurth Elektronik; Pin Number: 14; Working Voltage: 100VAC; Withstanding Voltage: 500VAC; Contact Resistance: 20mOhm; ComponentLink1Description: Datasheet; ComponentLink1URL: https://www.we-online.com/catalog/datasheet/62201421121.pdf; Published Date: May 2020; Pitch: 1.27mm; Packaging: Box; Gender: Pin Header; Rated Current: 1A; Row Number: Dual; Orientation: Vertical; Supplier 1 URL: N/A; Supplier 2 URL: N/A; Supplier 3 URL: N/A; LCSC Part #: N/A; Mount: SMD/SMT; Operating Temperature Max: + 105 C; Operating Temperature Min: - 40 C; Supplier 1: Mouser; Supplier 1 Part Number: N/A; Supplier 2: Digi-Key; Supplier 2 Part Number: N/A; Supplier 3: thegioiic; Supplier 3 Part Number: N/A; Value: 1A, 100 V (AC)
footprint 62201421121
pins: 1, 2, 3, 4, 5, 6, 7, 8, 9, 10, 11, 12, 13, 14

## 62201621121
designator P?, comment 1A, 100 V (AC)
WR-PHD Pin Header, THT, pitch 1.27mm, Dual Row, Vertical, 16p; Manufacturer Part Number: 62201621121; Manufacturer: Wurth Elektronik; Pin Number: 16; Working Voltage: 100VAC; Withstanding Voltage: 500VAC; Contact Resistance: 20mOhm; ComponentLink1Description: Datasheet; ComponentLink1URL: https://www.we-online.com/catalog/datasheet/62201621121.pdf; Published Date: May 2020; Pitch: 1.27mm; Packaging: Box; Gender: Pin Header; Rated Current: 1A; Row Number: Dual; Orientation: Vertical; Supplier 1 URL: https://www.mouser.vn/ProductDetail/Wurth-Elektronik/62201621121?qs=PhR8RmCirEZeW7yNjeLlUA%3D%3D; Supplier 2 URL: N/A; Supplier 3 URL: N/A; LCSC Part #: N/A; Mount: SMD/SMT; Operating Temperature Max: + 105 C; Operating Temperature Min: - 40 C; Supplier 1: Mouser; Supplier 1 Part Number: 710-62201621121; Supplier 2: Digi-Key; Supplier 2 Part Number: N/A; Supplier 3: thegioiic; Supplier 3 Part Number: N/A; Value: 1A, 100 V (AC)
footprint 62201621121
pins: 1, 2, 3, 4, 5, 6, 7, 8, 9, 10, 11, 12, 13, 14, 15, 16

## 62202021121
designator P?, comment 1A, 100 V (AC)
WR-PHD Pin Header, THT, pitch 1.27mm, Dual Row, Vertical, 20p; Manufacturer Part Number: 62202021121; Manufacturer: Wurth Elektronik; Pin Number: 20; Working Voltage: 100VAC; Withstanding Voltage: 500VAC; Contact Resistance: 20mOhm; ComponentLink1Description: Datasheet; ComponentLink1URL: https://www.we-online.com/catalog/datasheet/62202021121.pdf; Published Date: May 2020; Pitch: 1.27mm; Packaging: Box; Gender: Pin Header; Rated Current: 1A; Row Number: Dual; Orientation: Vertical; Supplier 1 URL: https://www.mouser.vn/ProductDetail/Wurth-Elektronik/62202021121?qs=PhR8RmCirEbogMhXhXGKJg%3D%3D; Supplier 2 URL: N/A; Supplier 3 URL: N/A; LCSC Part #: N/A; Mount: SMD/SMT; Operating Temperature Max: + 105 C; Operating Temperature Min: - 40 C; Supplier 1: Mouser; Supplier 1 Part Number: 710-62202021121; Supplier 2: Digi-Key; Supplier 2 Part Number: N/A; Supplier 3: thegioiic; Supplier 3 Part Number: N/A; Value: 1A, 100 V (AC)
footprint 62202021121
pins: 1, 2, 3, 4, 5, 6, 7, 8, 9, 10, 11, 12, 13, 14, 15, 16, 17, 18, 19, 20

## 62202821121
designator P?, comment 1A, 100 V (AC)
WR-PHD Pin Header, THT, pitch 1.27mm, Dual Row, Vertical, 28p; Manufacturer Part Number: 62202821121; Manufacturer: Wurth Elektronik; Pin Number: 28; Working Voltage: 100VAC; Withstanding Voltage: 500VAC; Contact Resistance: 20mOhm; ComponentLink1Description: Datasheet; ComponentLink1URL: https://www.we-online.com/catalog/datasheet/62202821121.pdf; Published Date: May 2020; Pitch: 1.27mm; Packaging: Box; Gender: Pin Header; Rated Current: 1A; Row Number: Dual; Orientation: Vertical; Supplier 1 URL: https://www.mouser.vn/ProductDetail/Wurth-Elektronik/62202821121?qs=PhR8RmCirEZdV6FK9AV24Q%3D%3D; Supplier 2 URL: N/A; Supplier 3 URL: N/A; LCSC Part #: N/A; Mount: SMD/SMT; Operating Temperature Max: + 105 C; Operating Temperature Min: - 40 C; Supplier 1: Mouser; Supplier 1 Part Number: 710-62202821121; Supplier 2: Digi-Key; Supplier 2 Part Number: N/A; Supplier 3: thegioiic; Supplier 3 Part Number: N/A; Value: 1A, 100 V (AC)
footprint 62202821121
pins: 1, 2, 3, 4, 5, 6, 7, 8, 9, 10, 11, 12, 13, 14, 15, 16, 17, 18, 19, 20, 21, 22, 23, 24, 25, 26, 27, 28

## 623310235521
designator P?, comment 1A, 100 V (AC)
WR-PHD Pin Header, SMT, pitch 1.27mm, Dual Row, Vertical, 10p; Manufacturer Part Number: 623310235521; Manufacturer: Wurth Elektronik; Pin Number: 10; Working Voltage: 100VAC; Withstanding Voltage: 500VAC; Contact Resistance: 20mOhm; ComponentLink1Description: Datasheet; ComponentLink1URL: https://www.we-online.com/catalog/datasheet/623310235521.pdf; Published Date: May 2020; Pitch: 1.27mm; Packaging: Tape and Reel; Gender: Pin Header; Rated Current: 1A; Row Number: Dual; Orientation: Vertical; Supplier 1 URL: https://www.mouser.vn/ProductDetail/Wurth-Elektronik/623310235521?qs=7D1LtPJG0i1zDmahu1AyYA%3D%3D; Supplier 2 URL: N/A; Supplier 3 URL: N/A; LCSC Part #: N/A; Mount: SMD/SMT; Operating Temperature Max: + 105 C; Operating Temperature Min: - 40 C; Supplier 1: Mouser; Supplier 1 Part Number: 710-623310235521; Supplier 2: Digi-Key; Supplier 2 Part Number: N/A; Supplier 3: thegioiic; Supplier 3 Part Number: N/A; Value: 1A, 100 V (AC)
footprint 623310235521
pins: 1, 2, 3, 4, 5, 6, 7, 8, 9, 10

## 623326235521
designator P?, comment 1A, 100 V (AC)
WR-PHD Pin Header, SMT, pitch 1.27mm, Dual Row, Vertical, 26p; Manufacturer Part Number: 623326235521; Manufacturer: Wurth Elektronik; Pin Number: 26; Working Voltage: 100VAC; Withstanding Voltage: 500VAC; Contact Resistance: 20mOhm; ComponentLink1Description: Datasheet; ComponentLink1URL: https://www.we-online.com/catalog/datasheet/623326235521.pdf; Published Date: May 2020; Pitch: 1.27mm; Packaging: Tape and Reel; Gender: Pin Header; Rated Current: 1A; Row Number: Dual; Orientation: Vertical; Supplier 1 URL: https://www.mouser.vn/ProductDetail/Wurth-Elektronik/623326235521?qs=7D1LtPJG0i1rhjs7i9FTWg%3D%3D; Supplier 2 URL: N/A; Supplier 3 URL: N/A; LCSC Part #: N/A; Mount: SMD/SMT; Operating Temperature Max: + 105 C; Operating Temperature Min: - 40 C; Supplier 1: Mouser; Supplier 1 Part Number: 710-623326235521; Supplier 2: Digi-Key; Supplier 2 Part Number: N/A; Supplier 3: thegioiic; Supplier 3 Part Number: N/A; Value: 1A, 100 V (AC)
footprint 623326235521
pins: 1, 2, 3, 4, 5, 6, 7, 8, 9, 10, 11, 12, 13, 14, 15, 16, 17, 18, 19, 20, 21, 22, 23, 24, 25, 26

## 623350235521
designator P?, comment 1A, 100 V (AC)
WR-PHD Pin Header, SMT, pitch 1.27mm, Dual Row, Vertical, 50p; Manufacturer Part Number: 623350235521; Manufacturer: Wurth Elektronik; Pin Number: 50; Working Voltage: 100VAC; Withstanding Voltage: 500VAC; Contact Resistance: 20mOhm; ComponentLink1Description: Datasheet; ComponentLink1URL: https://www.we-online.com/catalog/datasheet/623350235521.pdf; Published Date: May 2020; Pitch: 1.27mm; Packaging: Tape and Reel; Gender: Pin Header; Rated Current: 1A; Row Number: Dual; Orientation: Vertical; Supplier 1 URL: https://www.mouser.vn/ProductDetail/Wurth-Elektronik/623350235521?qs=3RJ0PdSuLVmMxJgiENseLA%3D%3D; Supplier 2 URL: N/A; Supplier 3 URL: N/A; LCSC Part #: N/A; Mount: SMD/SMT; Operating Temperature Max: + 105 C; Operating Temperature Min: - 40 C; Supplier 1: Mouser; Supplier 1 Part Number: 710-623350235521; Supplier 2: Digi-Key; Supplier 2 Part Number: N/A; Supplier 3: thegioiic; Supplier 3 Part Number: N/A; Value: 1A, 100 V (AC)
footprint 623350235521
pins: 1, 2, 3, 4, 5, 6, 7, 8, 9, 10, 11, 12, 13, 14, 15, 16, 17, 18, 19, 20, 21, 22, 23, 24, 25, 26, 27, 28, 29, 30, 31, 32, 33, 34, 35, 36, 37, 38, 39, 40, 41, 42, 43, 44, 45, 46, 47, 48, 49, 50


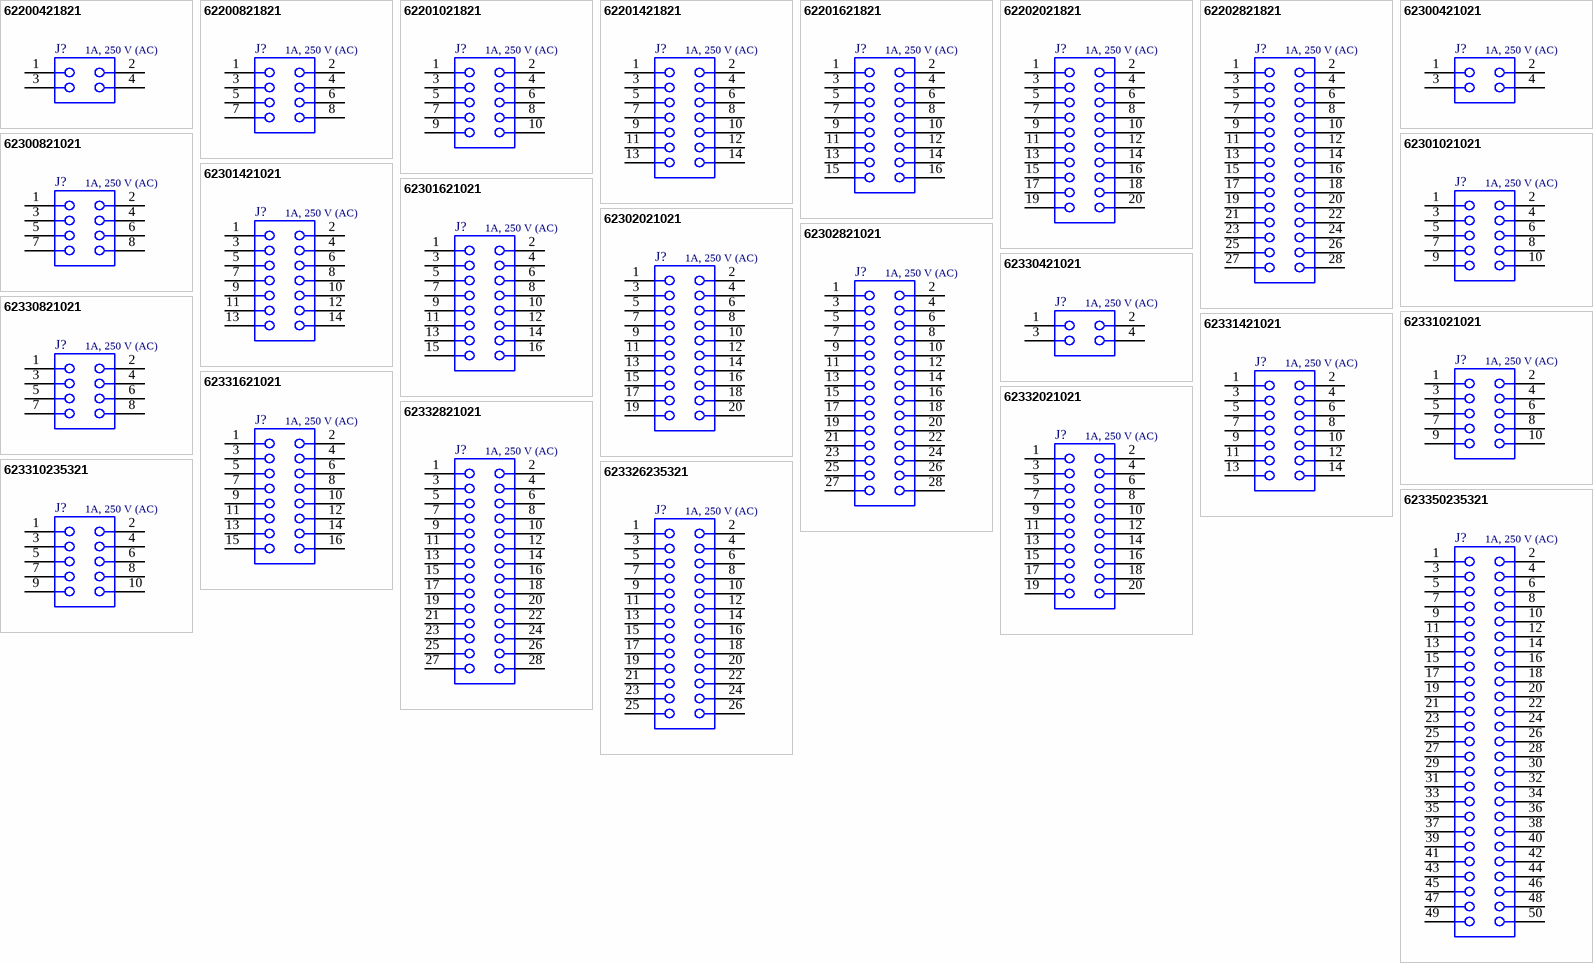
[diagram p16: symbols 62200421821 to 623350235321]

## 62200421821
designator J?, comment 1A, 250 V (AC)
WR-PHD Socket Header, THT, pitch 1.27mm, Dual Row, Vertical, 4p; Manufacturer Part Number: 62200421821; Manufacturer: Wurth Elektronik; Pin Number: 4; Working Voltage: 250VAC; Withstanding Voltage: 500VAC; Contact Resistance: 20mOhm; ComponentLink1Description: Datasheet; ComponentLink1URL: https://www.we-online.com/catalog/datasheet/62200421821.pdf; Published Date: May 2020; Pitch: 1.27mm; Packaging: Tube; Gender: Socket Header; Rated Current: 1A; Row Number: Dual; Orientation: Vertical; Supplier 1 URL: N/A; Supplier 2 URL: N/A; Supplier 3 URL: N/A; LCSC Part #: N/A; Mount: THT; Operating Temperature Max: + 85 C; Operating Temperature Min: - 25 C; Supplier 1: Mouser; Supplier 1 Part Number: N/A; Supplier 2: Digi-Key; Supplier 2 Part Number: N/A; Supplier 3: thegioiic; Supplier 3 Part Number: N/A; Value: 1A, 250 V (AC)
footprint 62200421821
pins: 1, 2, 3, 4

## 62200821821
designator J?, comment 1A, 250 V (AC)
WR-PHD Socket Header, THT, pitch 1.27mm, Dual Row, Vertical, 8p; Manufacturer Part Number: 62200821821; Manufacturer: Wurth Elektronik; Pin Number: 8; Working Voltage: 250VAC; Withstanding Voltage: 500VAC; Contact Resistance: 20mOhm; ComponentLink1Description: Datasheet; ComponentLink1URL: https://www.we-online.com/catalog/datasheet/62200821821.pdf; Published Date: May 2020; Pitch: 1.27mm; Packaging: Tube; Gender: Socket Header; Rated Current: 1A; Row Number: Dual; Orientation: Vertical; Supplier 1 URL: N/A; Supplier 2 URL: N/A; Supplier 3 URL: N/A; LCSC Part #: N/A; Mount: THT; Operating Temperature Max: + 85 C; Operating Temperature Min: - 25 C; Supplier 1: Mouser; Supplier 1 Part Number: N/A; Supplier 2: Digi-Key; Supplier 2 Part Number: N/A; Supplier 3: thegioiic; Supplier 3 Part Number: N/A; Value: 1A, 250 V (AC)
footprint 62200821821
pins: 1, 2, 3, 4, 5, 6, 7, 8

## 62201021821
designator J?, comment 1A, 250 V (AC)
WR-PHD Socket Header, THT, pitch 1.27mm, Dual Row, Vertical, 10p; Manufacturer Part Number: 62201021821; Manufacturer: Wurth Elektronik; Pin Number: 10; Working Voltage: 250VAC; Withstanding Voltage: 500VAC; Contact Resistance: 20mOhm; ComponentLink1Description: Datasheet; ComponentLink1URL: https://www.we-online.com/catalog/datasheet/62201021821.pdf; Published Date: May 2020; Pitch: 1.27mm; Packaging: Tube; Gender: Socket Header; Rated Current: 1A; Row Number: Dual; Orientation: Vertical; Supplier 1 URL: N/A; Supplier 2 URL: N/A; Supplier 3 URL: N/A; LCSC Part #: N/A; Mount: THT; Operating Temperature Max: + 85 C; Operating Temperature Min: - 25 C; Supplier 1: Mouser; Supplier 1 Part Number: N/A; Supplier 2: Digi-Key; Supplier 2 Part Number: N/A; Supplier 3: thegioiic; Supplier 3 Part Number: N/A; Value: 1A, 250 V (AC)
footprint 62201021821
pins: 1, 2, 3, 4, 5, 6, 7, 8, 9, 10

## 62201421821
designator J?, comment 1A, 250 V (AC)
WR-PHD Socket Header, THT, pitch 1.27mm, Dual Row, Vertical, 14p; Manufacturer Part Number: 62201421821; Manufacturer: Wurth Elektronik; Pin Number: 14; Working Voltage: 250VAC; Withstanding Voltage: 500VAC; Contact Resistance: 20mOhm; ComponentLink1Description: Datasheet; ComponentLink1URL: https://www.we-online.com/catalog/datasheet/62201421821.pdf; Published Date: May 2020; Pitch: 1.27mm; Packaging: Tube; Gender: Socket Header; Rated Current: 1A; Row Number: Dual; Orientation: Vertical; Supplier 1 URL: N/A; Supplier 2 URL: N/A; Supplier 3 URL: N/A; LCSC Part #: N/A; Mount: THT; Operating Temperature Max: + 85 C; Operating Temperature Min: - 25 C; Supplier 1: Mouser; Supplier 1 Part Number: N/A; Supplier 2: Digi-Key; Supplier 2 Part Number: N/A; Supplier 3: thegioiic; Supplier 3 Part Number: N/A; Value: 1A, 250 V (AC)
footprint 62201421821
pins: 1, 2, 3, 4, 5, 6, 7, 8, 9, 10, 11, 12, 13, 14

## 62201621821
designator J?, comment 1A, 250 V (AC)
WR-PHD Socket Header, THT, pitch 1.27mm, Dual Row, Vertical, 16p; Manufacturer Part Number: 62201621821; Manufacturer: Wurth Elektronik; Pin Number: 16; Working Voltage: 250VAC; Withstanding Voltage: 500VAC; Contact Resistance: 20mOhm; ComponentLink1Description: Datasheet; ComponentLink1URL: https://www.we-online.com/catalog/datasheet/62201621821.pdf; Published Date: May 2020; Pitch: 1.27mm; Packaging: Tube; Gender: Socket Header; Rated Current: 1A; Row Number: Dual; Orientation: Vertical; Supplier 1 URL: N/A; Supplier 2 URL: N/A; Supplier 3 URL: N/A; LCSC Part #: N/A; Mount: THT; Operating Temperature Max: + 85 C; Operating Temperature Min: - 25 C; Supplier 1: Mouser; Supplier 1 Part Number: N/A; Supplier 2: Digi-Key; Supplier 2 Part Number: N/A; Supplier 3: thegioiic; Supplier 3 Part Number: N/A; Value: 1A, 250 V (AC)
footprint 62201621821
pins: 1, 2, 3, 4, 5, 6, 7, 8, 9, 10, 11, 12, 13, 14, 15, 16

## 62202021821
designator J?, comment 1A, 250 V (AC)
WR-PHD Socket Header, THT, pitch 1.27mm, Dual Row, Vertical, 20p; Manufacturer Part Number: 62202021821; Manufacturer: Wurth Elektronik; Pin Number: 20; Working Voltage: 250VAC; Withstanding Voltage: 500VAC; Contact Resistance: 20mOhm; ComponentLink1Description: Datasheet; ComponentLink1URL: https://www.we-online.com/catalog/datasheet/62202021821.pdf; Published Date: May 2020; Pitch: 1.27mm; Packaging: Tube; Gender: Socket Header; Rated Current: 1A; Row Number: Dual; Orientation: Vertical; Supplier 1 URL: N/A; Supplier 2 URL: N/A; Supplier 3 URL: N/A; LCSC Part #: N/A; Mount: THT; Operating Temperature Max: + 85 C; Operating Temperature Min: - 25 C; Supplier 1: Mouser; Supplier 1 Part Number: N/A; Supplier 2: Digi-Key; Supplier 2 Part Number: N/A; Supplier 3: thegioiic; Supplier 3 Part Number: N/A; Value: 1A, 250 V (AC)
footprint 62202021821
pins: 1, 2, 3, 4, 5, 6, 7, 8, 9, 10, 11, 12, 13, 14, 15, 16, 17, 18, 19, 20

## 62202821821
designator J?, comment 1A, 250 V (AC)
WR-PHD Socket Header, THT, pitch 1.27mm, Dual Row, Vertical, 28p; Manufacturer Part Number: 62202821821; Manufacturer: Wurth Elektronik; Pin Number: 28; Working Voltage: 250VAC; Withstanding Voltage: 500VAC; Contact Resistance: 20mOhm; ComponentLink1Description: Datasheet; ComponentLink1URL: https://www.we-online.com/catalog/datasheet/62202821821.pdf; Published Date: May 2020; Pitch: 1.27mm; Packaging: Tube; Gender: Socket Header; Rated Current: 1A; Row Number: Dual; Orientation: Vertical; Supplier 1 URL: N/A; Supplier 2 URL: N/A; Supplier 3 URL: N/A; LCSC Part #: N/A; Mount: THT; Operating Temperature Max: + 85 C; Operating Temperature Min: - 25 C; Supplier 1: Mouser; Supplier 1 Part Number: N/A; Supplier 2: Digi-Key; Supplier 2 Part Number: N/A; Supplier 3: thegioiic; Supplier 3 Part Number: N/A; Value: 1A, 250 V (AC)
footprint 62202821821
pins: 1, 2, 3, 4, 5, 6, 7, 8, 9, 10, 11, 12, 13, 14, 15, 16, 17, 18, 19, 20, 21, 22, 23, 24, 25, 26, 27, 28

## 62300421021
designator J?, comment 1A, 250 V (AC)
WR-PHD Socket Header, SMT, pitch 1.27mm, Dual Row, Vertical, 4p; Manufacturer Part Number: 62300421021; Manufacturer: Wurth Elektronik; Pin Number: 4; Working Voltage: 250VAC; Withstanding Voltage: 500VAC; Contact Resistance: 20mOhm; ComponentLink1Description: Datasheet; ComponentLink1URL: https://www.we-online.com/catalog/datasheet/62300421021.pdf; Published Date: May 2020; Pitch: 1.27mm; Packaging: Tube; Gender: Socket Header; Rated Current: 1A; Row Number: Dual; Orientation: Vertical; Supplier 1 URL: N/A; Supplier 2 URL: N/A; Supplier 3 URL: N/A; LCSC Part #: N/A; Mount: SMD/SMT; Operating Temperature Max: + 85 C; Operating Temperature Min: - 25 C; Supplier 1: Mouser; Supplier 1 Part Number: N/A; Supplier 2: Digi-Key; Supplier 2 Part Number: N/A; Supplier 3: thegioiic; Supplier 3 Part Number: N/A; Value: 1A, 250 V (AC)
footprint 62300421021
pins: 1, 2, 3, 4

## 62300821021
designator J?, comment 1A, 250 V (AC)
WR-PHD Socket Header, SMT, pitch 1.27mm, Dual Row, Vertical, 8p; Manufacturer Part Number: 62300821021; Manufacturer: Wurth Elektronik; Pin Number: 8; Working Voltage: 250VAC; Withstanding Voltage: 500VAC; Contact Resistance: 20mOhm; ComponentLink1Description: Datasheet; ComponentLink1URL: https://www.we-online.com/catalog/datasheet/62300821021.pdf; Published Date: May 2020; Pitch: 1.27mm; Packaging: Tube; Gender: Socket Header; Rated Current: 1A; Row Number: Dual; Orientation: Vertical; Supplier 1 URL: N/A; Supplier 2 URL: N/A; Supplier 3 URL: N/A; LCSC Part #: N/A; Mount: SMD/SMT; Operating Temperature Max: + 85 C; Operating Temperature Min: - 25 C; Supplier 1: Mouser; Supplier 1 Part Number: N/A; Supplier 2: Digi-Key; Supplier 2 Part Number: N/A; Supplier 3: thegioiic; Supplier 3 Part Number: N/A; Value: 1A, 250 V (AC)
footprint 62300821021
pins: 1, 2, 3, 4, 5, 6, 7, 8

## 62301021021
designator J?, comment 1A, 250 V (AC)
WR-PHD Socket Header, SMT, pitch 1.27mm, Dual Row, Vertical, 10p; Manufacturer Part Number: 62301021021; Manufacturer: Wurth Elektronik; Pin Number: 10; Working Voltage: 250VAC; Withstanding Voltage: 500VAC; Contact Resistance: 20mOhm; ComponentLink1Description: Datasheet; ComponentLink1URL: https://www.we-online.com/catalog/datasheet/62301021021.pdf; Published Date: May 2020; Pitch: 1.27mm; Packaging: Tube; Gender: Socket Header; Rated Current: 1A; Row Number: Dual; Orientation: Vertical; Supplier 1 URL: N/A; Supplier 2 URL: N/A; Supplier 3 URL: N/A; LCSC Part #: N/A; Mount: SMD/SMT; Operating Temperature Max: + 85 C; Operating Temperature Min: - 25 C; Supplier 1: Mouser; Supplier 1 Part Number: N/A; Supplier 2: Digi-Key; Supplier 2 Part Number: N/A; Supplier 3: thegioiic; Supplier 3 Part Number: N/A; Value: 1A, 250 V (AC)
footprint 62301021021
pins: 1, 2, 3, 4, 5, 6, 7, 8, 9, 10

## 62301421021
designator J?, comment 1A, 250 V (AC)
WR-PHD Socket Header, SMT, pitch 1.27mm, Dual Row, Vertical, 14p; Manufacturer Part Number: 62301421021; Manufacturer: Wurth Elektronik; Pin Number: 14; Working Voltage: 250VAC; Withstanding Voltage: 500VAC; Contact Resistance: 20mOhm; ComponentLink1Description: Datasheet; ComponentLink1URL: https://www.we-online.com/catalog/datasheet/62301421021.pdf; Published Date: May 2020; Pitch: 1.27mm; Packaging: Tube; Gender: Socket Header; Rated Current: 1A; Row Number: Dual; Orientation: Vertical; Supplier 1 URL: N/A; Supplier 2 URL: N/A; Supplier 3 URL: N/A; LCSC Part #: N/A; Mount: SMD/SMT; Operating Temperature Max: + 85 C; Operating Temperature Min: - 25 C; Supplier 1: Mouser; Supplier 1 Part Number: N/A; Supplier 2: Digi-Key; Supplier 2 Part Number: N/A; Supplier 3: thegioiic; Supplier 3 Part Number: N/A; Value: 1A, 250 V (AC)
footprint 62301421021
pins: 1, 2, 3, 4, 5, 6, 7, 8, 9, 10, 11, 12, 13, 14